# Altium schematic symbol library BS170.SchLib: 1 symbol
Pins are listed as number, name and electrical type; pins without a type are passive.

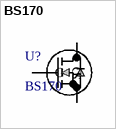
[diagram p0: symbol BS170]

## BS170
designator U?
Description; Manufacturer_Name: onsemi; Copyright: Copyright (C) 2025 Ultra Librarian. All rights reserved.; Manufacturer_Part_Number: BS170
footprint TO_SA06_ONS
pins: 1 G, 2 D, 3 S